# Altium footprint library Resistor.PcbLib: 85 footprints (part 4 of 6)
Each footprint in its own frame and in the unit in brackets; x right, y up, seen from the top. Pads: shape width x height; smd on the part's side, far side on the other; paste and mask are expansions set on the pad; w line width, h text height; cw(c..) or ccw(c..) is an arc to the next point about the centre after c.
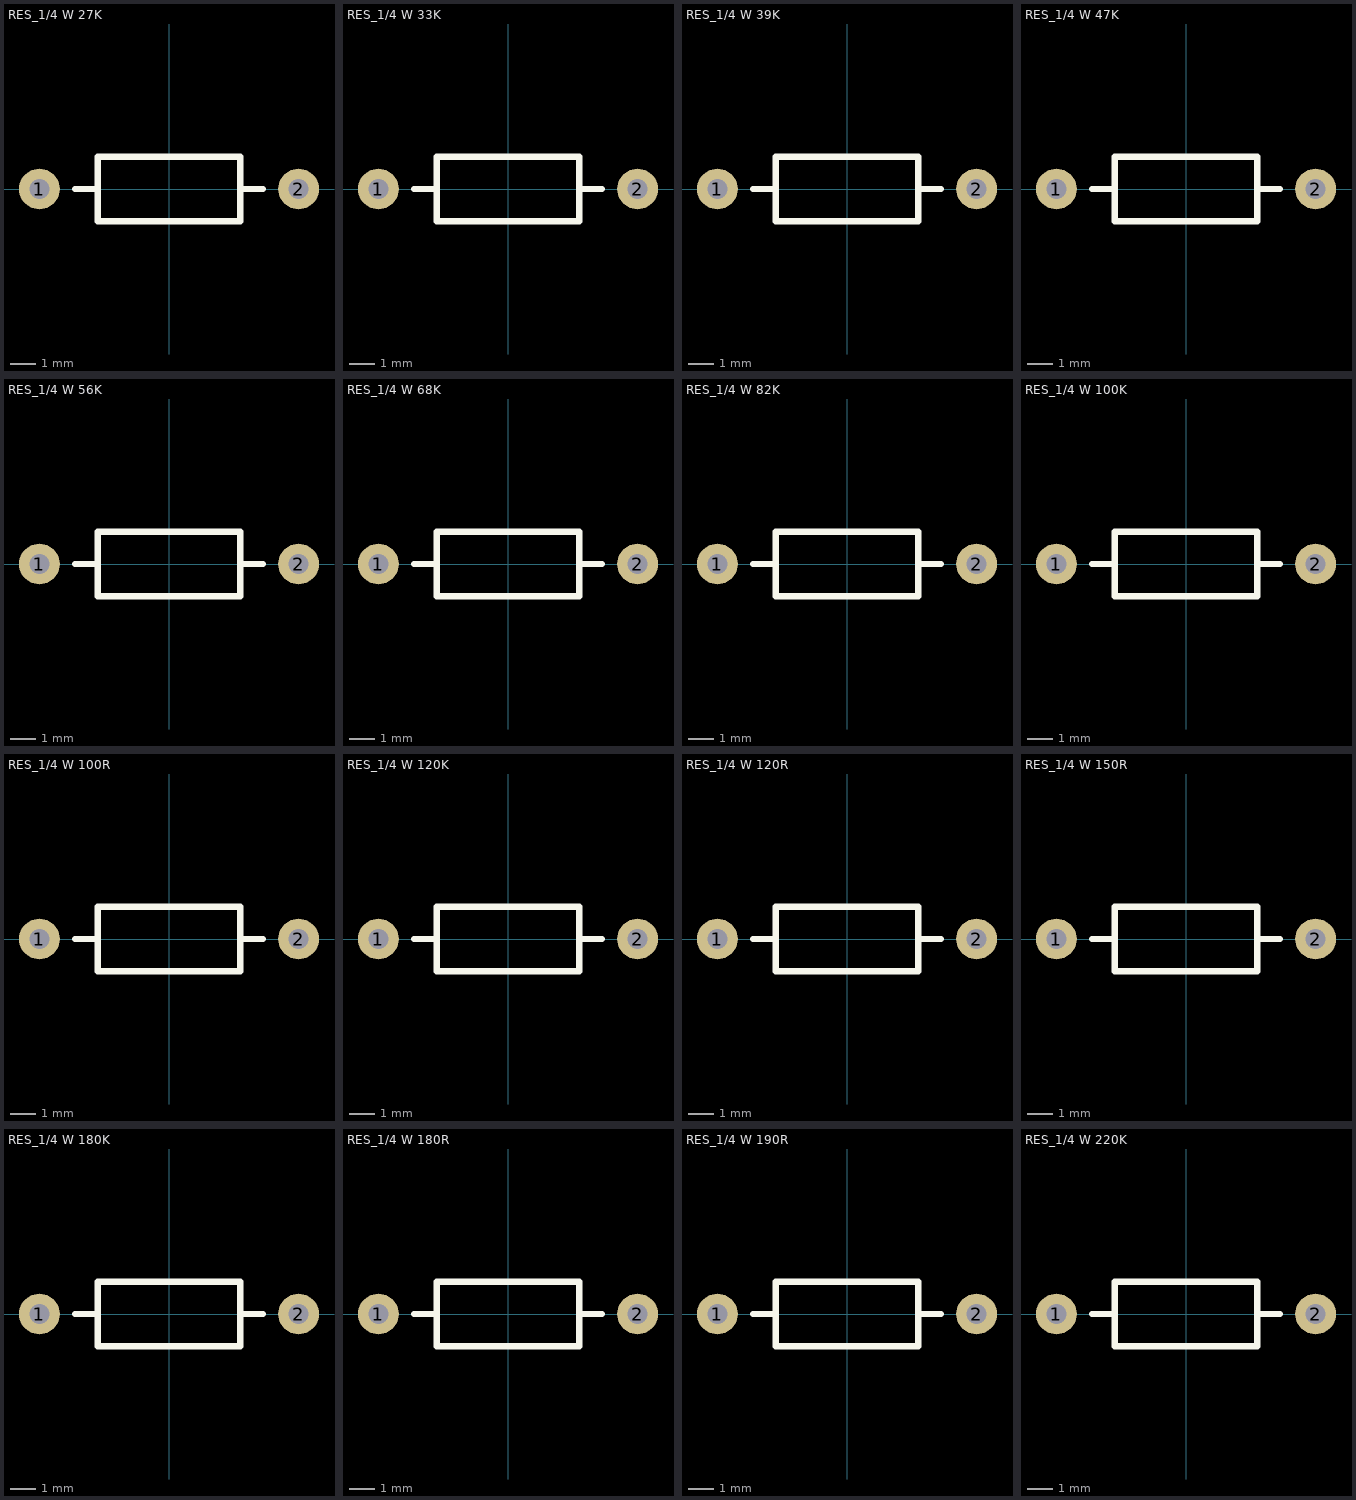
[diagram p3: the footprints below, top view; thin cyan lines are the x and y axes]

## RES_1/4 W 27K [mm]
pads (2):
  round 1.6 hole 0.787: 1(-5.08,0) 2(5.08,0)
Top Overlay:
  lines w0.254: -3.683,0 -2.794,0 ; 2.794,0 3.683,0 ; -2.794,-1.27 2.794,-1.27 2.794,1.27 -2.794,1.27 -2.794,-1.27
Top Designator:
  text ".Designator" at -3.71,-0.344 h1.52
3D body "27K.step": height 2.51, standoff -2, extent -5.255,-1.151 5.255,1.152

## RES_1/4 W 33K [mm]
pads (2):
  round 1.6 hole 0.787: 1(-5.08,0) 2(5.08,0)
Top Overlay:
  lines w0.254: -3.683,0 -2.794,0 ; 2.794,0 3.683,0 ; -2.794,-1.27 2.794,-1.27 2.794,1.27 -2.794,1.27 -2.794,-1.27
Top Designator:
  text ".Designator" at -3.71,-0.344 h1.52
3D body "33K.step": height 2.51, standoff -2, extent -5.255,-1.151 5.255,1.152

## RES_1/4 W 39K [mm]
pads (2):
  round 1.6 hole 0.787: 1(-5.08,0) 2(5.08,0)
Top Overlay:
  lines w0.254: -3.683,0 -2.794,0 ; 2.794,0 3.683,0 ; -2.794,-1.27 2.794,-1.27 2.794,1.27 -2.794,1.27 -2.794,-1.27
Top Designator:
  text ".Designator" at -3.71,-0.344 h1.52
3D body "39K.step": height 2.51, standoff -2, extent -5.255,-1.151 5.255,1.152

## RES_1/4 W 47K [mm]
pads (2):
  round 1.6 hole 0.787: 1(-5.08,0) 2(5.08,0)
Top Overlay:
  lines w0.254: -3.683,0 -2.794,0 ; 2.794,0 3.683,0 ; -2.794,-1.27 -2.794,1.27 2.794,1.27 2.794,-1.27 -2.794,-1.27
Top Designator:
  text ".Designator" at -3.71,-0.344 h1.52
3D body "47K.step": height 2.51, standoff -2, extent -5.255,-1.151 5.255,1.152

## RES_1/4 W 56K [mm]
pads (2):
  round 1.6 hole 0.787: 1(-5.08,0) 2(5.08,0)
Top Overlay:
  lines w0.254: -3.683,0 -2.794,0 ; 2.794,0 3.683,0 ; -2.794,-1.27 -2.794,1.27 2.794,1.27 2.794,-1.27 -2.794,-1.27
Top Designator:
  text ".Designator" at -3.71,-0.344 h1.52
3D body "56K.step": height 2.51, standoff -2, extent -5.255,-1.151 5.255,1.152

## RES_1/4 W 68K [mm]
pads (2):
  round 1.6 hole 0.787: 1(-5.08,0) 2(5.08,0)
Top Overlay:
  lines w0.254: -3.683,0 -2.794,0 ; 2.794,0 3.683,0 ; -2.794,-1.27 2.794,-1.27 2.794,1.27 -2.794,1.27 -2.794,-1.27
Top Designator:
  text ".Designator" at -3.71,-0.344 h1.52
3D body "68K.step": height 2.51, standoff -2, extent -5.255,-1.151 5.255,1.152

## RES_1/4 W 82K [mm]
pads (2):
  round 1.6 hole 0.787: 1(-5.08,0) 2(5.08,0)
Top Overlay:
  lines w0.254: -3.683,0 -2.794,0 ; 2.794,0 3.683,0 ; -2.794,-1.27 2.794,-1.27 2.794,1.27 -2.794,1.27 -2.794,-1.27
Top Designator:
  text ".Designator" at -3.71,-0.344 h1.52
3D body "82K.step": height 2.51, standoff -2, extent -5.255,-1.151 5.255,1.152

## RES_1/4 W 100K [mm]
pads (2):
  round 1.6 hole 0.787: 1(-5.08,0) 2(5.08,0)
Top Overlay:
  lines w0.254: -3.683,0 -2.794,0 ; 2.794,0 3.683,0 ; -2.794,-1.27 2.794,-1.27 2.794,1.27 -2.794,1.27 -2.794,-1.27
Top Designator:
  text ".Designator" at -3.71,-0.344 h1.52
3D body "100K.step": height 2.51, standoff -2, extent -5.255,-1.151 5.255,1.152

## RES_1/4 W 100R [mm]
pads (2):
  round 1.6 hole 0.787: 1(-5.08,0) 2(5.08,0)
Top Overlay:
  lines w0.254: -3.683,0 -2.794,0 ; 2.794,0 3.683,0 ; -2.794,-1.27 -2.794,1.27 2.794,1.27 2.794,-1.27 -2.794,-1.27
Top Designator:
  text ".Designator" at -3.71,-0.344 h1.52
3D body "100R.step": height 2.51, standoff -2, extent -5.255,-1.152 5.255,1.152

## RES_1/4 W 120K [mm]
pads (2):
  round 1.6 hole 0.787: 1(-5.08,0) 2(5.08,0)
Top Overlay:
  lines w0.254: -3.683,0 -2.794,0 ; 2.794,0 3.683,0 ; -2.794,-1.27 2.794,-1.27 2.794,1.27 -2.794,1.27 -2.794,-1.27
Top Designator:
  text ".Designator" at -3.71,-0.344 h1.52
3D body "120K.step": height 2.51, standoff -2, extent -5.255,-1.152 5.255,1.152

## RES_1/4 W 120R [mm]
pads (2):
  round 1.6 hole 0.787: 1(-5.08,0) 2(5.08,0)
Top Overlay:
  lines w0.254: -3.683,0 -2.794,0 ; 2.794,0 3.683,0 ; -2.794,-1.27 2.794,-1.27 2.794,1.27 -2.794,1.27 -2.794,-1.27
Top Designator:
  text ".Designator" at -3.71,-0.344 h1.52
3D body "120R.step": height 2.51, standoff -2, extent -5.255,-1.151 5.255,1.152

## RES_1/4 W 150R [mm]
pads (2):
  round 1.6 hole 0.787: 1(-5.08,0) 2(5.08,0)
Top Overlay:
  lines w0.254: -3.683,0 -2.794,0 ; 2.794,0 3.683,0 ; -2.794,-1.27 -2.794,1.27 2.794,1.27 2.794,-1.27 -2.794,-1.27
Top Designator:
  text ".Designator" at -3.71,-0.344 h1.52
3D body "150R.step": height 2.51, standoff -2, extent -5.255,-1.151 5.255,1.152

## RES_1/4 W 180K [mm]
pads (2):
  round 1.6 hole 0.787: 1(-5.08,0) 2(5.08,0)
Top Overlay:
  lines w0.254: -3.683,0 -2.794,0 ; 2.794,0 3.683,0 ; -2.794,-1.27 2.794,-1.27 2.794,1.27 -2.794,1.27 -2.794,-1.27
Top Designator:
  text ".Designator" at -3.71,-0.344 h1.52
3D body "180K.step": height 2.51, standoff -2, extent -5.255,-1.152 5.255,1.152

## RES_1/4 W 180R [mm]
pads (2):
  round 1.6 hole 0.787: 1(-5.08,0) 2(5.08,0)
Top Overlay:
  lines w0.254: -3.683,0 -2.794,0 ; 2.794,0 3.683,0 ; -2.794,-1.27 -2.794,1.27 2.794,1.27 2.794,-1.27 -2.794,-1.27
Top Designator:
  text ".Designator" at -3.71,-0.344 h1.52
3D body "180R.step": height 2.51, standoff -2, extent -5.255,-1.151 5.255,1.152

## RES_1/4 W 190R [mm]
pads (2):
  round 1.6 hole 0.787: 1(-5.08,0) 2(5.08,0)
Top Overlay:
  lines w0.254: -3.683,0 -2.794,0 ; 2.794,0 3.683,0 ; -2.794,-1.27 2.794,-1.27 2.794,1.27 -2.794,1.27 -2.794,-1.27
Top Designator:
  text ".Designator" at -3.71,-0.344 h1.52
3D body "190R.step": height 2.51, standoff -2, extent -5.255,-1.151 5.255,1.152

## RES_1/4 W 220K [mm]
pads (2):
  round 1.6 hole 0.787: 1(-5.08,0) 2(5.08,0)
Top Overlay:
  lines w0.254: -3.683,0 -2.794,0 ; 2.794,0 3.683,0 ; -2.794,-1.27 2.794,-1.27 2.794,1.27 -2.794,1.27 -2.794,-1.27
Top Designator:
  text ".Designator" at -3.71,-0.344 h1.52
3D body "220K.step": height 2.51, standoff -2, extent -5.255,-1.151 5.255,1.152